# Altium schematic symbol library CRGH0805J10K.SchLib: 1 symbol
Pins are listed as number, name and electrical type; pins without a type are passive.

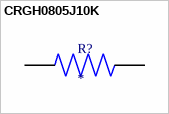
[diagram p0: symbol CRGH0805J10K]

## CRGH0805J10K
designator R?
Resistor, Thick Film, Surface Mnt, 0805 10kOhm +/-5% 0.33W +/-200ppm/degC | TE Connectivity CRGH0805J10K; Power_Rating: .33 W; Resistance: 10K; Voltage_Rating: 150 V; Tolerance: 5%; SnapEDA_Link: https://www.snapeda.com/parts/CRGH0805J10K/TE+Connectivity+Passive+Product/view-part/?ref=snap; Package: 0805; Value: *; MF: TE Connectivity; MP: CRGH0805J10K; EU_RoHS_Compliance: Compliant with Exemptions; Check_prices: https://www.snapeda.com/parts/CRGH0805J10K/TE+Connectivity+Passive+Product/view-part/?ref=eda
footprint RESC2012X65N
pins: 1, 2